# Altium footprint library LEDs.PcbLib: 14 footprints
Each footprint in its own frame and in the unit in brackets; x right, y up, seen from the top. Pads: shape width x height; smd on the part's side, far side on the other; paste and mask are expansions set on the pad; w line width, h text height; cw(c..) or ccw(c..) is an arc to the next point about the centre after c.
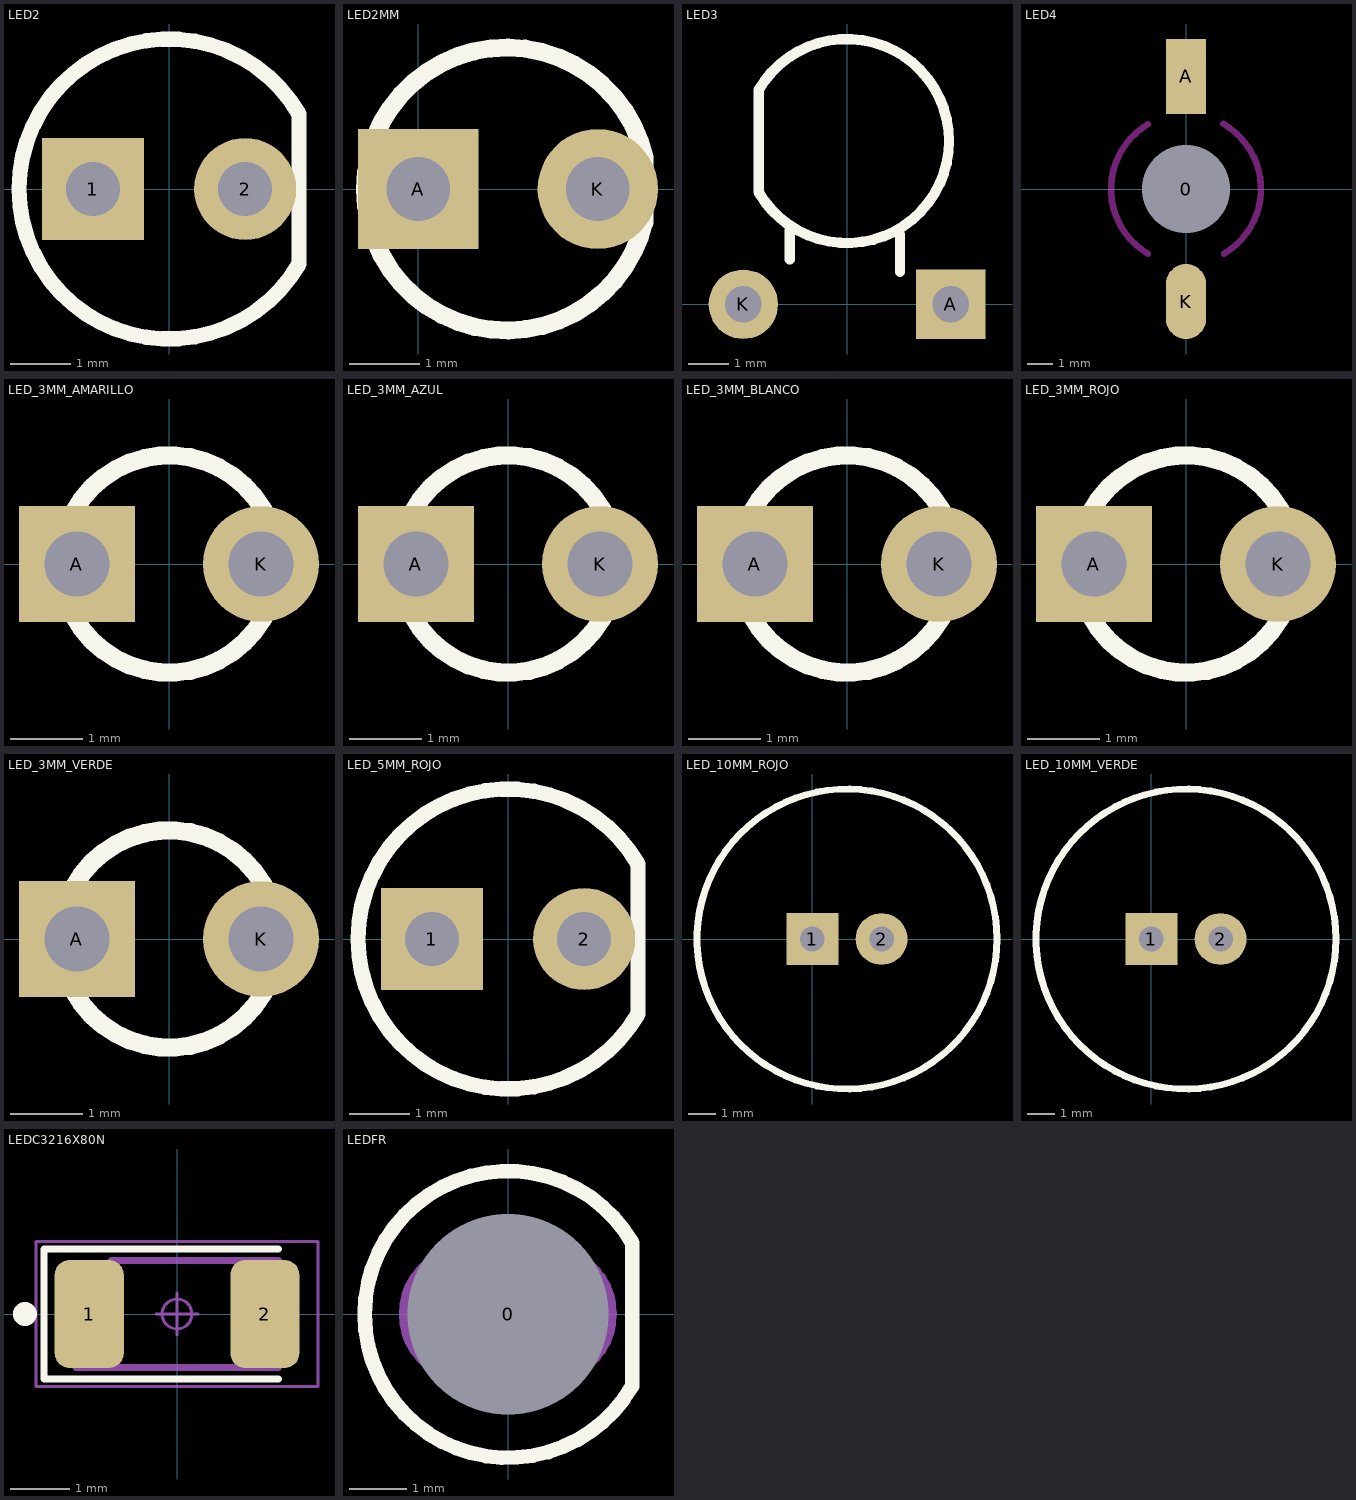
[diagram p0: the footprints below, top view; thin cyan lines are the x and y axes]

## LED2 [mm]
pads (2):
  rect 1.7x1.7 hole 0.9: 1(-1.27,0)
  round 1.7 hole 0.9: 2(1.27,0)
Top Overlay:
  lines w0.254: 2.165,-1.25 cw(c0,0) 2.165,1.25 2.165,-1.25

## LED2MM [mm]
pads (2):
  rect 1.7x1.7 hole 0.9: A(0,0)
  round 1.7 hole 0.9: K(2.54,0)
Top Overlay:
  lines w0.254: 3.2,-0.475 3.2,0.45 ; 3.201,0.439 ccw(c1.25,0) 3.202,-0.434

## LED3 [mm]
pads (2):
  rect 1.7x1.7 hole 0.9: A(2.54,0)
  round 1.7 hole 0.9: K(-2.54,0)
Top Overlay:
  lines w0.254: -1.4,1.1 -1.4,1.8 ; 1.3,0.8 1.3,1.7 ; -2.165,2.75 ccw(c0,4) -2.165,5.25 -2.165,2.75

## LED4 [mm]
pads (3):
  round 3 hole 3.5: 0(0,0)
  rect 1.6x3 smd: A(0,4.5)
  oval 1.6x3 smd: K(0,-4.5)
Keep-Out Layer:
  lines w0.254: -1.521,-2.586 cw(c0,0) -1.521,2.586 ; 1.488,2.605 cw(c0,0) 1.521,-2.586

## LED_3MM_AMARILLO [mm]
pads (2):
  rect 1.6x1.6 hole 0.9: A(-1.27,0)
  round 1.6 hole 0.9: K(1.27,0)
Top Overlay:
  lines w0.254: 1.299,-0.75 cw(c0,0) 1.299,0.75 1.299,-0.75
3D body "led-3r_yellow.step": height 6.1, standoff -3.5, extent -1.6,-1.6 1.6,1.6

## LED_3MM_AZUL [mm]
pads (2):
  rect 1.6x1.6 hole 0.9: A(-1.27,0)
  round 1.6 hole 0.9: K(1.27,0)
Top Overlay:
  lines w0.254: 1.299,-0.75 cw(c0,0) 1.299,0.75 1.299,-0.75
3D body "led-3r_blue.step": height 6.1, standoff -3.5, extent -1.6,-1.6 1.6,1.6

## LED_3MM_BLANCO [mm]
pads (2):
  rect 1.6x1.6 hole 0.9: A(-1.27,0)
  round 1.6 hole 0.9: K(1.27,0)
Top Overlay:
  lines w0.254: 1.299,-0.75 cw(c0,0) 1.299,0.75 1.299,-0.75
3D body "led-3r_white.step": height 6.1, standoff -3.5, extent -1.6,-1.6 1.6,1.6

## LED_3MM_ROJO [mm]
pads (2):
  rect 1.6x1.6 hole 0.9: A(-1.27,0)
  round 1.6 hole 0.9: K(1.27,0)
Top Overlay:
  lines w0.254: 1.299,-0.75 cw(c0,0) 1.299,0.75 1.299,-0.75
3D body "led-3r_red.step": height 6.1, standoff -3.5, extent -1.6,-1.6 1.6,1.6

## LED_3MM_VERDE [mm]
pads (2):
  rect 1.6x1.6 hole 0.9: A(-1.27,0)
  round 1.6 hole 0.9: K(1.27,0)
Top Overlay:
  lines w0.254: 1.299,-0.75 cw(c0,0) 1.299,0.75 1.299,-0.75
3D body "led-3r_green.step": height 6.1, standoff -3.5, extent -1.6,-1.6 1.6,1.6

## LED_5MM_ROJO [mm]
pads (2):
  rect 1.7x1.7 hole 0.9: 1(-1.27,0)
  round 1.7 hole 0.9: 2(1.27,0)
Top Overlay:
  lines w0.254: 2.165,-1.25 cw(c0,0) 2.165,1.25 2.165,-1.25
3D body "led-5r_red.step": height 8.6, standoff -5, extent -2.9,-2.9 2.5,2.899

## LED_10MM_ROJO [mm]
pads (2):
  rect 1.9x1.9 hole 0.9: 1(0,0)
  round 1.9 hole 0.9: 2(2.54,0)
Top Overlay:
  circle w0.25: c1.27,0 r5.5
3D body "led-10r_red.step": height 13.5, standoff -5, extent -4.2,-5.495 6.8,5.5

## LED_10MM_VERDE [mm]
pads (2):
  rect 1.9x1.9 hole 0.9: 1(0,0)
  round 1.9 hole 0.9: 2(2.54,0)
Top Overlay:
  circle w0.25: c1.27,0 r5.5
3D body "LED10mm.step": height 13.5, standoff -5, extent -4.23,-5.497 6.77,5.498

## LEDC3216X80N [mm] "LED, Chip;3.20 mm L X 1.60 mm W X 0.80 mm H body"
height 0.8
pads (2):
  rrect43% 1.16x1.82 smd: 1(-1.475,0) 2(1.475,0)
Top Overlay:
  circle w0.2: c-2.555,0 r0.1
  lines w0.12: 1.7,-1.09 -2.235,-1.09 -2.235,1.09 1.7,1.09
Mechanical 13:
  lines w0.001: -1.7,-0.9 1.7,-0.9 1.7,0.9 -1.7,0.9 -1.7,-0.9
  lines w0.12: -1.7,-0.9 1.7,-0.9 1.7,0.9 -1.1,0.9 -1.7,0.3 -1.7,-0.9
Mechanical 15:
  circle w0.05: c0,0 r0.25
  lines w0.05: -0.35,0 0.35,0 ; 0,-0.35 0,0.35 ; -2.37,-1.22 2.37,-1.22 2.37,1.22 -2.37,1.22 -2.37,-1.22
3D body "LEDC3216X80N.STEP": height 1.15, standoff 0, extent -1.6,-0.8 1.6,0.8

## LEDFR [mil]
pads (1):
  round 60 hole 137.8: 0(0,0)
Top Overlay:
  lines w10: 85.24,-49.21 cw(c0,0) 85.24,49.21 85.24,-49.21
Mechanical 1:
  lines w7.87: -70.99,0.24 cw(c-25.69,0.56) -69.08,13.59 cw(c-29.49,1.7) -60.08,29.51 cw(c-1.58,-23.67) -0.09,55.37 cw(c1.32,-23.67) 59.82,29.51 cw(c29.23,1.7) 68.83,13.59 cw(c25.44,0.56) 70.74,0.27 cw(c25.43,-0.05) 68.83,-13.07 cw(c29.23,-1.19) 59.82,-28.99 cw(c1.32,24.18) -0.09,-54.86 cw(c-1.58,24.19) -60.08,-28.99 cw(c-29.49,-1.19) -69.08,-13.07 cw(c-25.69,-0.05) -70.99,0.27